# Altium footprint library Package_BGA.PcbLib: 230 footprints (part 2 of 28)
Each footprint in its own frame and in the unit in brackets; x right, y up, seen from the top. Pads: shape width x height; smd on the part's side, far side on the other; paste and mask are expansions set on the pad; w line width, h text height; cw(c..) or ccw(c..) is an arc to the next point about the centre after c.
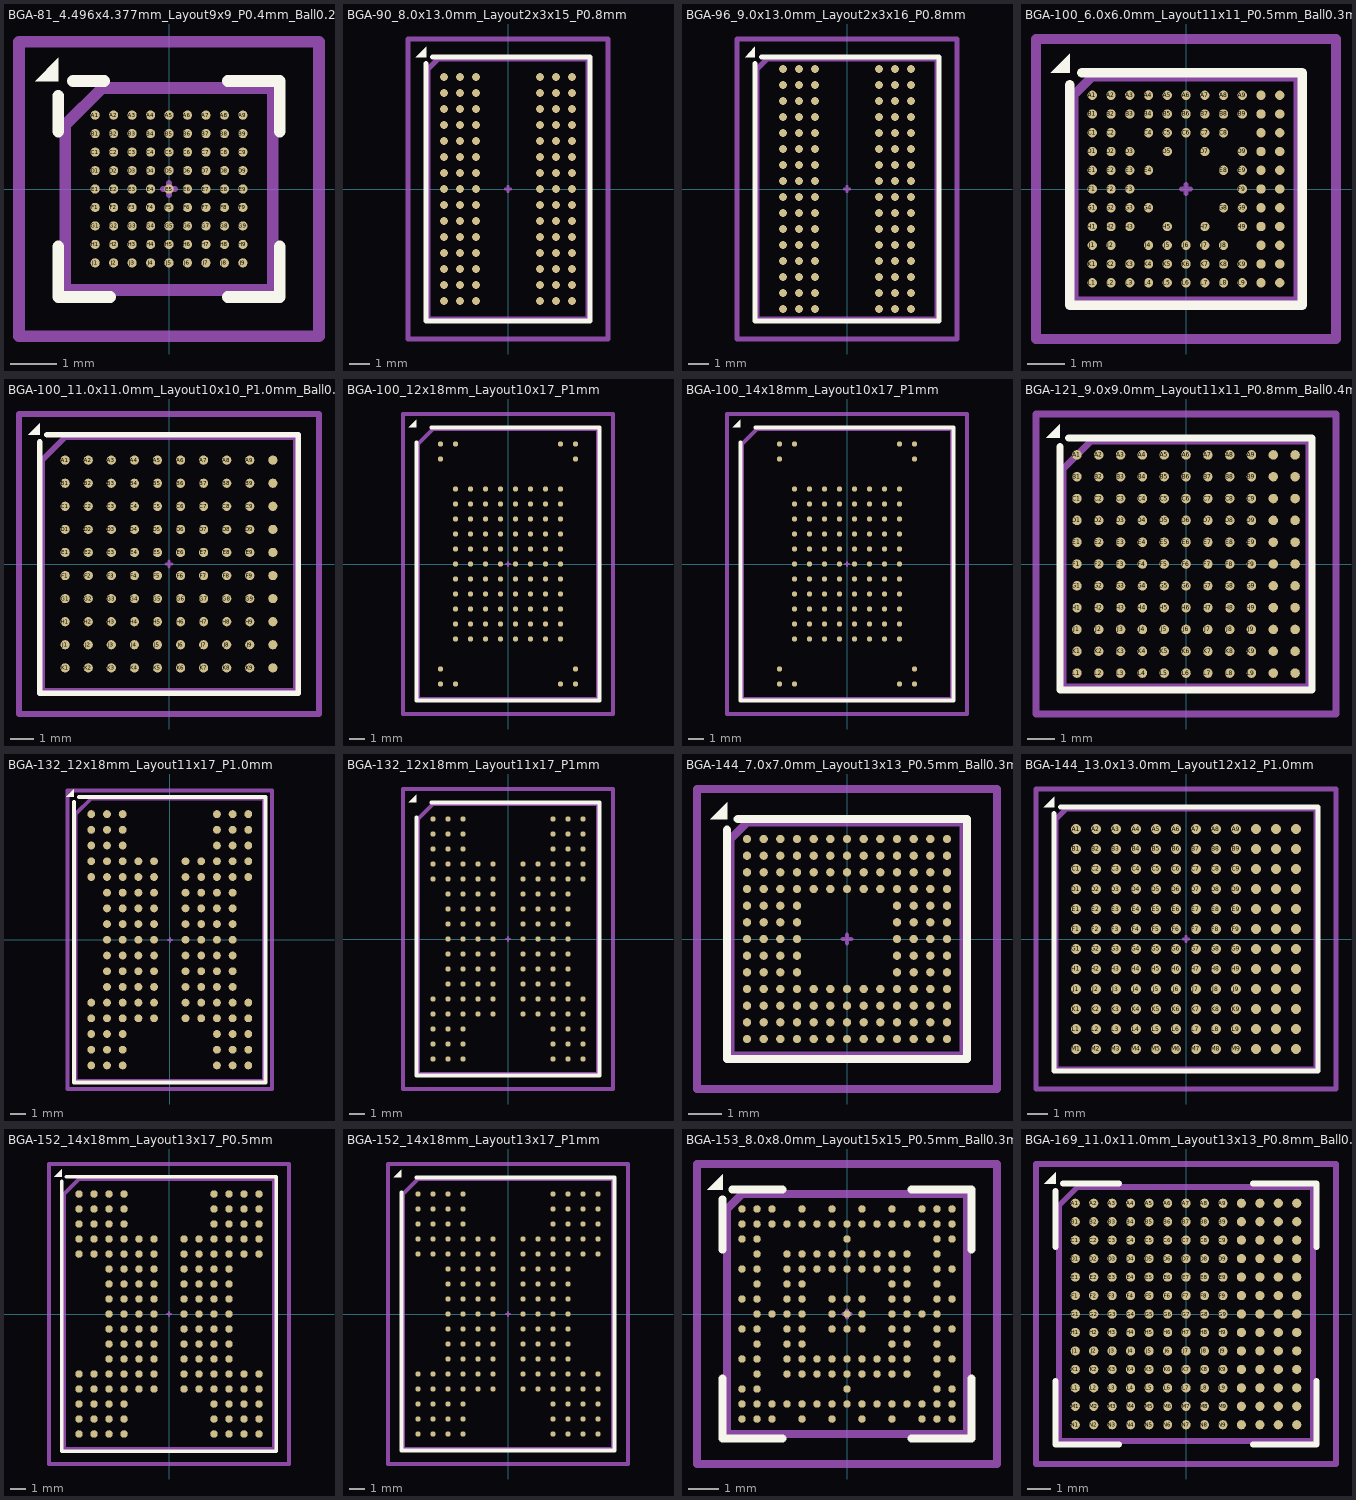
[diagram p1: the footprints below, top view; thin cyan lines are the x and y axes]

## BGA-81_4.496x4.377mm_Layout9x9_P0.4mm_Ball0.25mm_Pad0.2mm_NSMD [mm] "BGA-81_4.496x4.377mm_Layout9x9_P0.4mm_Ball0.25mm_Pad0.2mm_NSMD"
pads (81):
  round 0.2 smd: A1(-1.6,1.6) A2(-1.2,1.6) A3(-0.8,1.6) A4(-0.4,1.6) A5(0,1.6) A6(0.4,1.6) A7(0.8,1.6) A8(1.2,1.6) A9(1.6,1.6) B1(-1.6,1.2) B2(-1.2,1.2) B3(-0.8,1.2) B4(-0.4,1.2) B5(0,1.2) B6(0.4,1.2) B7(0.8,1.2) B8(1.2,1.2) B9(1.6,1.2) C1(-1.6,0.8) C2(-1.2,0.8) C3(-0.8,0.8) C4(-0.4,0.8) C5(0,0.8) C6(0.4,0.8) C7(0.8,0.8) C8(1.2,0.8) C9(1.6,0.8) D1(-1.6,0.4) D2(-1.2,0.4) D3(-0.8,0.4) D4(-0.4,0.4) D5(0,0.4) D6(0.4,0.4) D7(0.8,0.4) D8(1.2,0.4) D9(1.6,0.4) E1(-1.6,0) E2(-1.2,0) E3(-0.8,0) E4(-0.4,0) E5(0,0) E6(0.4,0) E7(0.8,0) E8(1.2,0) E9(1.6,0) F1(-1.6,-0.4) F2(-1.2,-0.4) F3(-0.8,-0.4) F4(-0.4,-0.4) F5(0,-0.4) F6(0.4,-0.4) F7(0.8,-0.4) F8(1.2,-0.4) F9(1.6,-0.4) G1(-1.6,-0.8) G2(-1.2,-0.8) G3(-0.8,-0.8) G4(-0.4,-0.8) G5(0,-0.8) G6(0.4,-0.8) G7(0.8,-0.8) G8(1.2,-0.8) G9(1.6,-0.8) H1(-1.6,-1.2) H2(-1.2,-1.2) H3(-0.8,-1.2) H4(-0.4,-1.2) H5(0,-1.2) H6(0.4,-1.2) H7(0.8,-1.2) H8(1.2,-1.2) H9(1.6,-1.2) J1(-1.6,-1.6) J2(-1.2,-1.6) J3(-0.8,-1.6) J4(-0.4,-1.6) J5(0,-1.6) J6(0.4,-1.6) J7(0.8,-1.6) J8(1.2,-1.6) J9(1.6,-1.6)
F.SilkS:
  region: -2.398,2.34 -2.898,2.34 -2.398,2.84
  lines w0.254: -2.398,-1.244 -2.398,-2.338 -1.274,-2.338 ; -2.398,1.244 -2.398,2.02 ; -2.078,2.34 -1.402,2.34 ; 1.274,-2.338 2.398,-2.338 2.398,-1.244 ; 1.274,2.338 2.398,2.338 2.398,1.244
Top Component Center:
  lines w0.127: -0.127,0 0.127,0 -0.127,0 ; 0,-0.127 0,0.127 0,-0.127
Top Assembly:
  lines w0.254: -2.248,-2.188 2.248,-2.188 2.248,2.188 -1.448,2.188 -2.248,1.389 -2.248,-2.188
Top Courtyard:
  lines w0.254: -3.25,-3.19 3.25,-3.19 3.25,3.19 -3.25,3.19 -3.25,-3.19
Top Designator:
  text ".Designator" at -3.432,-0.345 h1.52
3D body "BGA-81_4.496x4.377mm_Layout9x9_P0.4mm_Ball0.25mm_Pad0.2mm_NSMD.step": height 0.46, standoff -0.01, extent -2.188,-2.248 2.188,2.248

## BGA-90_8.0x13.0mm_Layout2x3x15_P0.8mm [mm] "BGA-90_8.0x13.0mm_Layout2x3x15_P0.8mm"
pads (90):
  round 0.4 smd: A1(-3.2,5.6) A2(-2.4,5.6) A3(-1.6,5.6) A7(1.6,5.6) A8(2.4,5.6) A9(3.2,5.6) B1(-3.2,4.8) B2(-2.4,4.8) B3(-1.6,4.8) B7(1.6,4.8) B8(2.4,4.8) B9(3.2,4.8) C1(-3.2,4) C2(-2.4,4) C3(-1.6,4) C7(1.6,4) C8(2.4,4) C9(3.2,4) D1(-3.2,3.2) D2(-2.4,3.2) D3(-1.6,3.2) D7(1.6,3.2) D8(2.4,3.2) D9(3.2,3.2) E1(-3.2,2.4) E2(-2.4,2.4) E3(-1.6,2.4) E7(1.6,2.4) E8(2.4,2.4) E9(3.2,2.4) F1(-3.2,1.6) F2(-2.4,1.6) F3(-1.6,1.6) F7(1.6,1.6) F8(2.4,1.6) F9(3.2,1.6) G1(-3.2,0.8) G2(-2.4,0.8) G3(-1.6,0.8) G7(1.6,0.8) G8(2.4,0.8) G9(3.2,0.8) H1(-3.2,0) H2(-2.4,0) H3(-1.6,0) H7(1.6,0) H8(2.4,0) H9(3.2,0) J1(-3.2,-0.8) J2(-2.4,-0.8) J3(-1.6,-0.8) J7(1.6,-0.8) J8(2.4,-0.8) J9(3.2,-0.8) K1(-3.2,-1.6) K2(-2.4,-1.6) K3(-1.6,-1.6) K7(1.6,-1.6) K8(2.4,-1.6) K9(3.2,-1.6) L1(-3.2,-2.4) L2(-2.4,-2.4) L3(-1.6,-2.4) L7(1.6,-2.4) L8(2.4,-2.4) L9(3.2,-2.4) M1(-3.2,-3.2) M2(-2.4,-3.2) M3(-1.6,-3.2) M7(1.6,-3.2) M8(2.4,-3.2) M9(3.2,-3.2) N1(-3.2,-4) N2(-2.4,-4) N3(-1.6,-4) N7(1.6,-4) N8(2.4,-4) N9(3.2,-4) P1(-3.2,-4.8) P2(-2.4,-4.8) P3(-1.6,-4.8) P7(1.6,-4.8) P8(2.4,-4.8) P9(3.2,-4.8) R1(-3.2,-5.6) R2(-2.4,-5.6) R3(-1.6,-5.6) R7(1.6,-5.6) R8(2.4,-5.6) R9(3.2,-5.6)
F.SilkS:
  region: -4.1,6.6 -4.6,6.6 -4.1,7.1
  lines w0.254: -4.1,6.28 -4.1,-6.6 4.1,-6.6 4.1,6.6 -3.78,6.6
Top Component Center:
  lines w0.127: -0.127,0 0.127,0 -0.127,0 ; 0,-0.127 0,0.127 0,-0.127
Top Assembly:
  lines w0.254: -4,-6.5 -4,6 -3.5,6.5 4,6.5 4,-6.5 -4,-6.5
Top Courtyard:
  lines w0.254: -5,-7.5 -5,7.5 5,7.5 5,-7.5 -5,-7.5
Top Designator:
  text ".Designator" at -3.432,-0.345 h1.52
3D body "BGA-90_8.0x13.0mm_Layout2x3x15_P0.8mm.step": height 1.2, standoff -0.01, extent -4,-6.5 4,6.5

## BGA-96_9.0x13.0mm_Layout2x3x16_P0.8mm [mm] "BGA-96_9.0x13.0mm_Layout2x3x16_P0.8mm"
pads (96):
  round 0.4 smd: A1(-3.2,6) A2(-2.4,6) A3(-1.6,6) A7(1.6,6) A8(2.4,6) A9(3.2,6) B1(-3.2,5.2) B2(-2.4,5.2) B3(-1.6,5.2) B7(1.6,5.2) B8(2.4,5.2) B9(3.2,5.2) C1(-3.2,4.4) C2(-2.4,4.4) C3(-1.6,4.4) C7(1.6,4.4) C8(2.4,4.4) C9(3.2,4.4) D1(-3.2,3.6) D2(-2.4,3.6) D3(-1.6,3.6) D7(1.6,3.6) D8(2.4,3.6) D9(3.2,3.6) E1(-3.2,2.8) E2(-2.4,2.8) E3(-1.6,2.8) E7(1.6,2.8) E8(2.4,2.8) E9(3.2,2.8) F1(-3.2,2) F2(-2.4,2) F3(-1.6,2) F7(1.6,2) F8(2.4,2) F9(3.2,2) G1(-3.2,1.2) G2(-2.4,1.2) G3(-1.6,1.2) G7(1.6,1.2) G8(2.4,1.2) G9(3.2,1.2) H1(-3.2,0.4) H2(-2.4,0.4) H3(-1.6,0.4) H7(1.6,0.4) H8(2.4,0.4) H9(3.2,0.4) J1(-3.2,-0.4) J2(-2.4,-0.4) J3(-1.6,-0.4) J7(1.6,-0.4) J8(2.4,-0.4) J9(3.2,-0.4) K1(-3.2,-1.2) K2(-2.4,-1.2) K3(-1.6,-1.2) K7(1.6,-1.2) K8(2.4,-1.2) K9(3.2,-1.2) L1(-3.2,-2) L2(-2.4,-2) L3(-1.6,-2) L7(1.6,-2) L8(2.4,-2) L9(3.2,-2) M1(-3.2,-2.8) M2(-2.4,-2.8) M3(-1.6,-2.8) M7(1.6,-2.8) M8(2.4,-2.8) M9(3.2,-2.8) N1(-3.2,-3.6) N2(-2.4,-3.6) N3(-1.6,-3.6) N7(1.6,-3.6) N8(2.4,-3.6) N9(3.2,-3.6) P1(-3.2,-4.4) P2(-2.4,-4.4) P3(-1.6,-4.4) P7(1.6,-4.4) P8(2.4,-4.4) P9(3.2,-4.4) R1(-3.2,-5.2) R2(-2.4,-5.2) R3(-1.6,-5.2) R7(1.6,-5.2) R8(2.4,-5.2) R9(3.2,-5.2) T1(-3.2,-6) T2(-2.4,-6) T3(-1.6,-6) T7(1.6,-6) T8(2.4,-6) T9(3.2,-6)
F.SilkS:
  region: -4.6,6.6 -5.1,6.6 -4.6,7.1
  lines w0.254: -4.6,6.28 -4.6,-6.6 4.6,-6.6 4.6,6.6 -4.28,6.6
Top Component Center:
  lines w0.127: -0.127,0 0.127,0 -0.127,0 ; 0,-0.127 0,0.127 0,-0.127
Top Assembly:
  lines w0.254: -4.5,-6.5 -4.5,6 -4,6.5 4.5,6.5 4.5,-6.5 -4.5,-6.5
Top Courtyard:
  lines w0.254: -5.5,-7.5 -5.5,7.5 5.5,7.5 5.5,-7.5 -5.5,-7.5
Top Designator:
  text ".Designator" at -3.432,-0.345 h1.52
3D body "BGA-96_9.0x13.0mm_Layout2x3x16_P0.8mm.step": height 1.2, standoff -0.01, extent -4.5,-6.5 4.5,6.5

## BGA-100_6.0x6.0mm_Layout11x11_P0.5mm_Ball0.3mm_Pad0.25mm_NSMD [mm] "BGA-100_6.0x6.0mm_Layout11x11_P0.5mm_Ball0.3mm_Pad0.25mm_NSMD"
pads (100):
  round 0.25 smd: A1(-2.5,2.5) A2(-2,2.5) A3(-1.5,2.5) A4(-1,2.5) A5(-0.5,2.5) A6(0,2.5) A7(0.5,2.5) A8(1,2.5) A9(1.5,2.5) A10(2,2.5) A11(2.5,2.5) B1(-2.5,2) B2(-2,2) B3(-1.5,2) B4(-1,2) B5(-0.5,2) B6(0,2) B7(0.5,2) B8(1,2) B9(1.5,2) B10(2,2) B11(2.5,2) C1(-2.5,1.5) C2(-2,1.5) C4(-1,1.5) C5(-0.5,1.5) C6(0,1.5) C7(0.5,1.5) C8(1,1.5) C10(2,1.5) C11(2.5,1.5) D1(-2.5,1) D2(-2,1) D3(-1.5,1) D5(-0.5,1) D7(0.5,1) D9(1.5,1) D10(2,1) D11(2.5,1) E1(-2.5,0.5) E2(-2,0.5) E3(-1.5,0.5) E4(-1,0.5) E8(1,0.5) E9(1.5,0.5) E10(2,0.5) E11(2.5,0.5) F1(-2.5,0) F2(-2,0) F3(-1.5,0) F9(1.5,0) F10(2,0) F11(2.5,0) G1(-2.5,-0.5) G2(-2,-0.5) G3(-1.5,-0.5) G4(-1,-0.5) G8(1,-0.5) G9(1.5,-0.5) G10(2,-0.5) G11(2.5,-0.5) H1(-2.5,-1) H2(-2,-1) H3(-1.5,-1) H5(-0.5,-1) H7(0.5,-1) H9(1.5,-1) H10(2,-1) H11(2.5,-1) J1(-2.5,-1.5) J2(-2,-1.5) J4(-1,-1.5) J5(-0.5,-1.5) J6(0,-1.5) J7(0.5,-1.5) J8(1,-1.5) J10(2,-1.5) J11(2.5,-1.5) K1(-2.5,-2) K2(-2,-2) K3(-1.5,-2) K4(-1,-2) K5(-0.5,-2) K6(0,-2) K7(0.5,-2) K8(1,-2) K9(1.5,-2) K10(2,-2) K11(2.5,-2) L1(-2.5,-2.5) L2(-2,-2.5) L3(-1.5,-2.5) L4(-1,-2.5) L5(-0.5,-2.5) L6(0,-2.5) L7(0.5,-2.5) L8(1,-2.5) L9(1.5,-2.5) L10(2,-2.5) L11(2.5,-2.5)
F.SilkS:
  region: -3.1,3.1 -3.6,3.1 -3.1,3.6
  lines w0.254: -3.1,2.78 -3.1,-3.1 3.1,-3.1 3.1,3.1 -2.78,3.1
Top Component Center:
  lines w0.127: -0.127,0 0.127,0 -0.127,0 ; 0,-0.127 0,0.127 0,-0.127
Top Assembly:
  lines w0.254: -3,-3 3,-3 3,3 -2.5,3 -3,2.5 -3,-3
Top Courtyard:
  lines w0.254: -4,-4 4,-4 4,4 -4,4 -4,-4
Top Designator:
  text ".Designator" at -3.432,-0.345 h1.52
3D body "BGA-100_6.0x6.0mm_Layout11x11_P0.5mm_Ball0.3mm_Pad0.25mm_NSMD.step": height 1.05, standoff -0.01, extent -3,-3 3,3

## BGA-100_11.0x11.0mm_Layout10x10_P1.0mm_Ball0.5mm_Pad0.4mm_NSMD [mm] "BGA-100_11.0x11.0mm_Layout10x10_P1.0mm_Ball0.5mm_Pad0.4mm_NSMD"
pads (100):
  round 0.4 smd: A1(-4.5,4.5) A2(-3.5,4.5) A3(-2.5,4.5) A4(-1.5,4.5) A5(-0.5,4.5) A6(0.5,4.5) A7(1.5,4.5) A8(2.5,4.5) A9(3.5,4.5) A10(4.5,4.5) B1(-4.5,3.5) B2(-3.5,3.5) B3(-2.5,3.5) B4(-1.5,3.5) B5(-0.5,3.5) B6(0.5,3.5) B7(1.5,3.5) B8(2.5,3.5) B9(3.5,3.5) B10(4.5,3.5) C1(-4.5,2.5) C2(-3.5,2.5) C3(-2.5,2.5) C4(-1.5,2.5) C5(-0.5,2.5) C6(0.5,2.5) C7(1.5,2.5) C8(2.5,2.5) C9(3.5,2.5) C10(4.5,2.5) D1(-4.5,1.5) D2(-3.5,1.5) D3(-2.5,1.5) D4(-1.5,1.5) D5(-0.5,1.5) D6(0.5,1.5) D7(1.5,1.5) D8(2.5,1.5) D9(3.5,1.5) D10(4.5,1.5) E1(-4.5,0.5) E2(-3.5,0.5) E3(-2.5,0.5) E4(-1.5,0.5) E5(-0.5,0.5) E6(0.5,0.5) E7(1.5,0.5) E8(2.5,0.5) E9(3.5,0.5) E10(4.5,0.5) F1(-4.5,-0.5) F2(-3.5,-0.5) F3(-2.5,-0.5) F4(-1.5,-0.5) F5(-0.5,-0.5) F6(0.5,-0.5) F7(1.5,-0.5) F8(2.5,-0.5) F9(3.5,-0.5) F10(4.5,-0.5) G1(-4.5,-1.5) G2(-3.5,-1.5) G3(-2.5,-1.5) G4(-1.5,-1.5) G5(-0.5,-1.5) G6(0.5,-1.5) G7(1.5,-1.5) G8(2.5,-1.5) G9(3.5,-1.5) G10(4.5,-1.5) H1(-4.5,-2.5) H2(-3.5,-2.5) H3(-2.5,-2.5) H4(-1.5,-2.5) H5(-0.5,-2.5) H6(0.5,-2.5) H7(1.5,-2.5) H8(2.5,-2.5) H9(3.5,-2.5) H10(4.5,-2.5) J1(-4.5,-3.5) J2(-3.5,-3.5) J3(-2.5,-3.5) J4(-1.5,-3.5) J5(-0.5,-3.5) J6(0.5,-3.5) J7(1.5,-3.5) J8(2.5,-3.5) J9(3.5,-3.5) J10(4.5,-3.5) K1(-4.5,-4.5) K2(-3.5,-4.5) K3(-2.5,-4.5) K4(-1.5,-4.5) K5(-0.5,-4.5) K6(0.5,-4.5) K7(1.5,-4.5) K8(2.5,-4.5) K9(3.5,-4.5) K10(4.5,-4.5)
F.SilkS:
  region: -5.6,5.6 -6.1,5.6 -5.6,6.1
  lines w0.254: -5.6,5.28 -5.6,-5.6 5.6,-5.6 5.6,5.6 -5.28,5.6
Top Component Center:
  lines w0.127: -0.127,0 0.127,0 -0.127,0 ; 0,-0.127 0,0.127 0,-0.127
Top Assembly:
  lines w0.254: -5.5,-5.5 -5.5,4.5 -4.5,5.5 5.5,5.5 5.5,-5.5 -5.5,-5.5
Top Courtyard:
  lines w0.254: -6.5,-6.5 -6.5,6.5 6.5,6.5 6.5,-6.5 -6.5,-6.5
Top Designator:
  text ".Designator" at -3.432,-0.345 h1.52
3D body "BGA-100_11.0x11.0mm_Layout10x10_P1.0mm_Ball0.5mm_Pad0.4mm_NSMD.step": height 1.4, standoff -0.01, extent -5.5,-5.5 5.5,5.5

## BGA-100_12x18mm_Layout10x17_P1mm [mm] "BGA-100_12x18mm_Layout10x17_P1mm"
pads (100):
  round 0.36 smd: A1(-4.5,8) A2(-3.5,8) A9(3.5,8) A10(4.5,8) B1(-4.5,7) B10(4.5,7) D2(-3.5,5) D3(-2.5,5) D4(-1.5,5) D5(-0.5,5) D6(0.5,5) D7(1.5,5) D8(2.5,5) D9(3.5,5) E2(-3.5,4) E3(-2.5,4) E4(-1.5,4) E5(-0.5,4) E6(0.5,4) E7(1.5,4) E8(2.5,4) E9(3.5,4) F2(-3.5,3) F3(-2.5,3) F4(-1.5,3) F5(-0.5,3) F6(0.5,3) F7(1.5,3) F8(2.5,3) F9(3.5,3) G2(-3.5,2) G3(-2.5,2) G4(-1.5,2) G5(-0.5,2) G6(0.5,2) G7(1.5,2) G8(2.5,2) G9(3.5,2) H2(-3.5,1) H3(-2.5,1) H4(-1.5,1) H5(-0.5,1) H6(0.5,1) H7(1.5,1) H8(2.5,1) H9(3.5,1) J2(-3.5,0) J3(-2.5,0) J4(-1.5,0) J5(-0.5,0) J6(0.5,0) J7(1.5,0) J8(2.5,0) J9(3.5,0) K2(-3.5,-1) K3(-2.5,-1) K4(-1.5,-1) K5(-0.5,-1) K6(0.5,-1) K7(1.5,-1) K8(2.5,-1) K9(3.5,-1) L2(-3.5,-2) L3(-2.5,-2) L4(-1.5,-2) L5(-0.5,-2) L6(0.5,-2) L7(1.5,-2) L8(2.5,-2) L9(3.5,-2) M2(-3.5,-3) M3(-2.5,-3) M4(-1.5,-3) M5(-0.5,-3) M6(0.5,-3) M7(1.5,-3) M8(2.5,-3) M9(3.5,-3) N2(-3.5,-4) N3(-2.5,-4) N4(-1.5,-4) N5(-0.5,-4) N6(0.5,-4) N7(1.5,-4) N8(2.5,-4) N9(3.5,-4) P2(-3.5,-5) P3(-2.5,-5) P4(-1.5,-5) P5(-0.5,-5) P6(0.5,-5) P7(1.5,-5) P8(2.5,-5) P9(3.5,-5) T1(-4.5,-7) T10(4.5,-7) U1(-4.5,-8) U2(-3.5,-8) U9(3.5,-8) U10(4.5,-8)
F.SilkS:
  region: -6.11,9.11 -6.61,9.11 -6.11,9.61
  lines w0.254: -6.11,8.11 -6.11,-9.11 6.11,-9.11 6.11,9.11 -5.11,9.11
Top Component Center:
  lines w0.127: -0.127,0 0.127,0 -0.127,0 ; 0,-0.127 0,0.127 0,-0.127
Top Assembly:
  lines w0.254: -6,-9 -6,8 -5,9 6,9 6,-9 -6,-9
Top Courtyard:
  lines w0.254: -7,-10 -7,10 7,10 7,-10 -7,-10
Top Designator:
  text ".Designator" at -3.432,-0.345 h1.52

## BGA-100_14x18mm_Layout10x17_P1mm [mm] "BGA-100_14x18mm_Layout10x17_P1mm"
pads (100):
  round 0.36 smd: A1(-4.5,8) A2(-3.5,8) A9(3.5,8) A10(4.5,8) B1(-4.5,7) B10(4.5,7) D2(-3.5,5) D3(-2.5,5) D4(-1.5,5) D5(-0.5,5) D6(0.5,5) D7(1.5,5) D8(2.5,5) D9(3.5,5) E2(-3.5,4) E3(-2.5,4) E4(-1.5,4) E5(-0.5,4) E6(0.5,4) E7(1.5,4) E8(2.5,4) E9(3.5,4) F2(-3.5,3) F3(-2.5,3) F4(-1.5,3) F5(-0.5,3) F6(0.5,3) F7(1.5,3) F8(2.5,3) F9(3.5,3) G2(-3.5,2) G3(-2.5,2) G4(-1.5,2) G5(-0.5,2) G6(0.5,2) G7(1.5,2) G8(2.5,2) G9(3.5,2) H2(-3.5,1) H3(-2.5,1) H4(-1.5,1) H5(-0.5,1) H6(0.5,1) H7(1.5,1) H8(2.5,1) H9(3.5,1) J2(-3.5,0) J3(-2.5,0) J4(-1.5,0) J5(-0.5,0) J6(0.5,0) J7(1.5,0) J8(2.5,0) J9(3.5,0) K2(-3.5,-1) K3(-2.5,-1) K4(-1.5,-1) K5(-0.5,-1) K6(0.5,-1) K7(1.5,-1) K8(2.5,-1) K9(3.5,-1) L2(-3.5,-2) L3(-2.5,-2) L4(-1.5,-2) L5(-0.5,-2) L6(0.5,-2) L7(1.5,-2) L8(2.5,-2) L9(3.5,-2) M2(-3.5,-3) M3(-2.5,-3) M4(-1.5,-3) M5(-0.5,-3) M6(0.5,-3) M7(1.5,-3) M8(2.5,-3) M9(3.5,-3) N2(-3.5,-4) N3(-2.5,-4) N4(-1.5,-4) N5(-0.5,-4) N6(0.5,-4) N7(1.5,-4) N8(2.5,-4) N9(3.5,-4) P2(-3.5,-5) P3(-2.5,-5) P4(-1.5,-5) P5(-0.5,-5) P6(0.5,-5) P7(1.5,-5) P8(2.5,-5) P9(3.5,-5) T1(-4.5,-7) T10(4.5,-7) U1(-4.5,-8) U2(-3.5,-8) U9(3.5,-8) U10(4.5,-8)
F.SilkS:
  region: -7.11,9.11 -7.61,9.11 -7.11,9.61
  lines w0.254: -7.11,8.11 -7.11,-9.11 7.11,-9.11 7.11,9.11 -6.11,9.11
Top Component Center:
  lines w0.127: -0.127,0 0.127,0 -0.127,0 ; 0,-0.127 0,0.127 0,-0.127
Top Assembly:
  lines w0.254: -7,-9 -7,8 -6,9 7,9 7,-9 -7,-9
Top Courtyard:
  lines w0.254: -8,-10 -8,10 8,10 8,-10 -8,-10
Top Designator:
  text ".Designator" at -3.432,-0.345 h1.52

## BGA-121_9.0x9.0mm_Layout11x11_P0.8mm_Ball0.4mm_Pad0.35mm_NSMD [mm] "BGA-121_9.0x9.0mm_Layout11x11_P0.8mm_Ball0.4mm_Pad0.35mm_NSMD"
pads (121):
  round 0.35 smd: A1(-4,4) A2(-3.2,4) A3(-2.4,4) A4(-1.6,4) A5(-0.8,4) A6(0,4) A7(0.8,4) A8(1.6,4) A9(2.4,4) A10(3.2,4) A11(4,4) B1(-4,3.2) B2(-3.2,3.2) B3(-2.4,3.2) B4(-1.6,3.2) B5(-0.8,3.2) B6(0,3.2) B7(0.8,3.2) B8(1.6,3.2) B9(2.4,3.2) B10(3.2,3.2) B11(4,3.2) C1(-4,2.4) C2(-3.2,2.4) C3(-2.4,2.4) C4(-1.6,2.4) C5(-0.8,2.4) C6(0,2.4) C7(0.8,2.4) C8(1.6,2.4) C9(2.4,2.4) C10(3.2,2.4) C11(4,2.4) D1(-4,1.6) D2(-3.2,1.6) D3(-2.4,1.6) D4(-1.6,1.6) D5(-0.8,1.6) D6(0,1.6) D7(0.8,1.6) D8(1.6,1.6) D9(2.4,1.6) D10(3.2,1.6) D11(4,1.6) E1(-4,0.8) E2(-3.2,0.8) E3(-2.4,0.8) E4(-1.6,0.8) E5(-0.8,0.8) E6(0,0.8) E7(0.8,0.8) E8(1.6,0.8) E9(2.4,0.8) E10(3.2,0.8) E11(4,0.8) F1(-4,0) F2(-3.2,0) F3(-2.4,0) F4(-1.6,0) F5(-0.8,0) F6(0,0) F7(0.8,0) F8(1.6,0) F9(2.4,0) F10(3.2,0) F11(4,0) G1(-4,-0.8) G2(-3.2,-0.8) G3(-2.4,-0.8) G4(-1.6,-0.8) G5(-0.8,-0.8) G6(0,-0.8) G7(0.8,-0.8) G8(1.6,-0.8) G9(2.4,-0.8) G10(3.2,-0.8) G11(4,-0.8) H1(-4,-1.6) H2(-3.2,-1.6) H3(-2.4,-1.6) H4(-1.6,-1.6) H5(-0.8,-1.6) H6(0,-1.6) H7(0.8,-1.6) H8(1.6,-1.6) H9(2.4,-1.6) H10(3.2,-1.6) H11(4,-1.6) J1(-4,-2.4) J2(-3.2,-2.4) J3(-2.4,-2.4) J4(-1.6,-2.4) J5(-0.8,-2.4) J6(0,-2.4) J7(0.8,-2.4) J8(1.6,-2.4) J9(2.4,-2.4) J10(3.2,-2.4) J11(4,-2.4) K1(-4,-3.2) K2(-3.2,-3.2) K3(-2.4,-3.2) K4(-1.6,-3.2) K5(-0.8,-3.2) K6(0,-3.2) K7(0.8,-3.2) K8(1.6,-3.2) K9(2.4,-3.2) K10(3.2,-3.2) K11(4,-3.2) L1(-4,-4) L2(-3.2,-4) L3(-2.4,-4) L4(-1.6,-4) L5(-0.8,-4) L6(0,-4) L7(0.8,-4) L8(1.6,-4) L9(2.4,-4) L10(3.2,-4) L11(4,-4)
F.SilkS:
  region: -4.625,4.625 -5.125,4.625 -4.625,5.125
  lines w0.254: -4.625,4.305 -4.625,-4.625 4.625,-4.625 4.625,4.625 -4.305,4.625
Top Component Center:
  lines w0.127: -0.127,0 0.127,0 -0.127,0 ; 0,-0.127 0,0.127 0,-0.127
Top Assembly:
  lines w0.254: -4.5,-4.5 4.5,-4.5 4.5,4.5 -3.5,4.5 -4.5,3.5 -4.5,-4.5
Top Courtyard:
  lines w0.254: -5.5,-5.5 5.5,-5.5 5.5,5.5 -5.5,5.5 -5.5,-5.5
Top Designator:
  text ".Designator" at -3.432,-0.345 h1.52
3D body "BGA-121_9.0x9.0mm_Layout11x11_P0.8mm.step": height 1.1, standoff -0.01, extent -4.5,-4.5 4.5,4.5

## BGA-132_12x18mm_Layout11x17_P1.0mm [mm] "BGA-132_12x18mm_Layout11x17_P1.0mm"
pads (132):
  round 0.5 smd: A1(-5,8) A2(-4,8) A3(-3,8) A9(3,8) A10(4,8) A11(5,8) B1(-5,7) B2(-4,7) B3(-3,7) B9(3,7) B10(4,7) B11(5,7) C1(-5,6) C2(-4,6) C3(-3,6) C9(3,6) C10(4,6) C11(5,6) D1(-5,5) D2(-4,5) D3(-3,5) D4(-2,5) D5(-1,5) D7(1,5) D8(2,5) D9(3,5) D10(4,5) D11(5,5) E1(-5,4) E2(-4,4) E3(-3,4) E4(-2,4) E5(-1,4) E7(1,4) E8(2,4) E9(3,4) E10(4,4) E11(5,4) F2(-4,3) F3(-3,3) F4(-2,3) F5(-1,3) F7(1,3) F8(2,3) F9(3,3) F10(4,3) G2(-4,2) G3(-3,2) G4(-2,2) G5(-1,2) G7(1,2) G8(2,2) G9(3,2) G10(4,2) H2(-4,1) H3(-3,1) H4(-2,1) H5(-1,1) H7(1,1) H8(2,1) H9(3,1) H10(4,1) J2(-4,0) J3(-3,0) J4(-2,0) J5(-1,0) J7(1,0) J8(2,0) J9(3,0) J10(4,0) K2(-4,-1) K3(-3,-1) K4(-2,-1) K5(-1,-1) K7(1,-1) K8(2,-1) K9(3,-1) K10(4,-1) L2(-4,-2) L3(-3,-2) L4(-2,-2) L5(-1,-2) L7(1,-2) L8(2,-2) L9(3,-2) L10(4,-2) M2(-4,-3) M3(-3,-3) M4(-2,-3) M5(-1,-3) M7(1,-3) M8(2,-3) M9(3,-3) M10(4,-3) N1(-5,-4) N2(-4,-4) N3(-3,-4) N4(-2,-4) N5(-1,-4) N7(1,-4) N8(2,-4) N9(3,-4) N10(4,-4) N11(5,-4) P1(-5,-5) P2(-4,-5) P3(-3,-5) P4(-2,-5) P5(-1,-5) P7(1,-5) P8(2,-5) P9(3,-5) P10(4,-5) P11(5,-5) R1(-5,-6) R2(-4,-6) R3(-3,-6) R9(3,-6) R10(4,-6) R11(5,-6) T1(-5,-7) T2(-4,-7) T3(-3,-7) T9(3,-7) T10(4,-7) T11(5,-7) U1(-5,-8) U2(-4,-8) U3(-3,-8) U9(3,-8) U10(4,-8) U11(5,-8)
F.SilkS:
  region: -6.1,9.1 -6.6,9.1 -6.1,9.6
  lines w0.254: -6.1,8.78 -6.1,-9.1 6.1,-9.1 6.1,9.1 -5.78,9.1
Top Component Center:
  lines w0.127: -0.127,0 0.127,0 -0.127,0 ; 0,-0.127 0,0.127 0,-0.127
Top Assembly:
  lines w0.254: -6,-9 -6,8 -5,9 6,9 6,-9 -6,-9
  text "'.Designator'" at -4.047,9.36 h1
Top Courtyard:
  lines w0.254: -6.5,-9.5 -6.5,9.5 6.5,9.5 6.5,-9.5 -6.5,-9.5
Top Designator:
  text ".Designator" at -7.618,-0.043 h1.52

## BGA-132_12x18mm_Layout11x17_P1mm [mm] "BGA-132_12x18mm_Layout11x17_P1mm"
pads (132):
  round 0.36 smd: A1(-5,8) A2(-4,8) A3(-3,8) A9(3,8) A10(4,8) A11(5,8) B1(-5,7) B2(-4,7) B3(-3,7) B9(3,7) B10(4,7) B11(5,7) C1(-5,6) C2(-4,6) C3(-3,6) C9(3,6) C10(4,6) C11(5,6) D1(-5,5) D2(-4,5) D3(-3,5) D4(-2,5) D5(-1,5) D7(1,5) D8(2,5) D9(3,5) D10(4,5) D11(5,5) E1(-5,4) E2(-4,4) E3(-3,4) E4(-2,4) E5(-1,4) E7(1,4) E8(2,4) E9(3,4) E10(4,4) E11(5,4) F2(-4,3) F3(-3,3) F4(-2,3) F5(-1,3) F7(1,3) F8(2,3) F9(3,3) F10(4,3) G2(-4,2) G3(-3,2) G4(-2,2) G5(-1,2) G7(1,2) G8(2,2) G9(3,2) G10(4,2) H2(-4,1) H3(-3,1) H4(-2,1) H5(-1,1) H7(1,1) H8(2,1) H9(3,1) H10(4,1) J2(-4,0) J3(-3,0) J4(-2,0) J5(-1,0) J7(1,0) J8(2,0) J9(3,0) J10(4,0) K2(-4,-1) K3(-3,-1) K4(-2,-1) K5(-1,-1) K7(1,-1) K8(2,-1) K9(3,-1) K10(4,-1) L2(-4,-2) L3(-3,-2) L4(-2,-2) L5(-1,-2) L7(1,-2) L8(2,-2) L9(3,-2) L10(4,-2) M2(-4,-3) M3(-3,-3) M4(-2,-3) M5(-1,-3) M7(1,-3) M8(2,-3) M9(3,-3) M10(4,-3) N1(-5,-4) N2(-4,-4) N3(-3,-4) N4(-2,-4) N5(-1,-4) N7(1,-4) N8(2,-4) N9(3,-4) N10(4,-4) N11(5,-4) P1(-5,-5) P2(-4,-5) P3(-3,-5) P4(-2,-5) P5(-1,-5) P7(1,-5) P8(2,-5) P9(3,-5) P10(4,-5) P11(5,-5) R1(-5,-6) R2(-4,-6) R3(-3,-6) R9(3,-6) R10(4,-6) R11(5,-6) T1(-5,-7) T2(-4,-7) T3(-3,-7) T9(3,-7) T10(4,-7) T11(5,-7) U1(-5,-8) U2(-4,-8) U3(-3,-8) U9(3,-8) U10(4,-8) U11(5,-8)
F.SilkS:
  region: -6.11,9.11 -6.61,9.11 -6.11,9.61
  lines w0.254: -6.11,8.11 -6.11,-9.11 6.11,-9.11 6.11,9.11 -5.11,9.11
Top Component Center:
  lines w0.127: -0.127,0 0.127,0 -0.127,0 ; 0,-0.127 0,0.127 0,-0.127
Top Assembly:
  lines w0.254: -6,-9 -6,8 -5,9 6,9 6,-9 -6,-9
Top Courtyard:
  lines w0.254: -7,-10 -7,10 7,10 7,-10 -7,-10
Top Designator:
  text ".Designator" at -3.432,-0.345 h1.52

## BGA-144_7.0x7.0mm_Layout13x13_P0.5mm_Ball0.3mm_Pad0.25mm_NSMD [mm] "BGA-144_7.0x7.0mm_Layout13x13_P0.5mm_Ball0.3mm_Pad0.25mm_NSMD"
pads (144):
  round 0.25 smd: A1(-3,3) A2(-2.5,3) A3(-2,3) A4(-1.5,3) A5(-1,3) A6(-0.5,3) A7(0,3) A8(0.5,3) A9(1,3) A10(1.5,3) A11(2,3) A12(2.5,3) A13(3,3) B1(-3,2.5) B2(-2.5,2.5) B3(-2,2.5) B4(-1.5,2.5) B5(-1,2.5) B6(-0.5,2.5) B7(0,2.5) B8(0.5,2.5) B9(1,2.5) B10(1.5,2.5) B11(2,2.5) B12(2.5,2.5) B13(3,2.5) C1(-3,2) C2(-2.5,2) C3(-2,2) C4(-1.5,2) C5(-1,2) C6(-0.5,2) C7(0,2) C8(0.5,2) C9(1,2) C10(1.5,2) C11(2,2) C12(2.5,2) C13(3,2) D1(-3,1.5) D2(-2.5,1.5) D3(-2,1.5) D4(-1.5,1.5) D5(-1,1.5) D6(-0.5,1.5) D7(0,1.5) D8(0.5,1.5) D9(1,1.5) D10(1.5,1.5) D11(2,1.5) D12(2.5,1.5) D13(3,1.5) E1(-3,1) E2(-2.5,1) E3(-2,1) E4(-1.5,1) E10(1.5,1) E11(2,1) E12(2.5,1) E13(3,1) F1(-3,0.5) F2(-2.5,0.5) F3(-2,0.5) F4(-1.5,0.5) F10(1.5,0.5) F11(2,0.5) F12(2.5,0.5) F13(3,0.5) G1(-3,0) G2(-2.5,0) G3(-2,0) G4(-1.5,0) G10(1.5,0) G11(2,0) G12(2.5,0) G13(3,0) H1(-3,-0.5) H2(-2.5,-0.5) H3(-2,-0.5) H4(-1.5,-0.5) H10(1.5,-0.5) H11(2,-0.5) H12(2.5,-0.5) H13(3,-0.5) J1(-3,-1) J2(-2.5,-1) J3(-2,-1) J4(-1.5,-1) J10(1.5,-1) J11(2,-1) J12(2.5,-1) J13(3,-1) K1(-3,-1.5) K2(-2.5,-1.5) K3(-2,-1.5) K4(-1.5,-1.5) K5(-1,-1.5) K6(-0.5,-1.5) K7(0,-1.5) K8(0.5,-1.5) K9(1,-1.5) K10(1.5,-1.5) K11(2,-1.5) K12(2.5,-1.5) K13(3,-1.5) L1(-3,-2) L2(-2.5,-2) L3(-2,-2) L4(-1.5,-2) L5(-1,-2) L6(-0.5,-2) L7(0,-2) L8(0.5,-2) L9(1,-2) L10(1.5,-2) L11(2,-2) L12(2.5,-2) L13(3,-2) M1(-3,-2.5) M2(-2.5,-2.5) M3(-2,-2.5) M4(-1.5,-2.5) M5(-1,-2.5) M6(-0.5,-2.5) M7(0,-2.5) M8(0.5,-2.5) M9(1,-2.5) M10(1.5,-2.5) M11(2,-2.5) M12(2.5,-2.5) M13(3,-2.5) N1(-3,-3) N2(-2.5,-3) N3(-2,-3) N4(-1.5,-3) N5(-1,-3) N6(-0.5,-3) N7(0,-3) N8(0.5,-3) N9(1,-3) N10(1.5,-3) N11(2,-3) N12(2.5,-3) N13(3,-3)
F.SilkS:
  region: -3.6,3.6 -4.1,3.6 -3.6,4.1
  lines w0.254: -3.6,3.28 -3.6,-3.6 3.6,-3.6 3.6,3.6 -3.28,3.6
Top Component Center:
  lines w0.127: -0.127,0 0.127,0 -0.127,0 ; 0,-0.127 0,0.127 0,-0.127
Top Assembly:
  lines w0.254: -3.5,-3.5 3.5,-3.5 3.5,3.5 -3,3.5 -3.5,3 -3.5,-3.5
Top Courtyard:
  lines w0.254: -4.5,-4.5 4.5,-4.5 4.5,4.5 -4.5,4.5 -4.5,-4.5
Top Designator:
  text ".Designator" at -3.432,-0.345 h1.52
3D body "BGA-144_7.0x7.0mm_Layout13x13_P0.5mm_Ball0.3mm_Pad0.25mm_NSMD.step": height 1.05, standoff -0.01, extent -3.5,-3.5 3.5,3.5

## BGA-144_13.0x13.0mm_Layout12x12_P1.0mm [mm] "BGA-144_13.0x13.0mm_Layout12x12_P1.0mm"
pads (144):
  round 0.5 smd: A1(-5.5,5.5) A2(-4.5,5.5) A3(-3.5,5.5) A4(-2.5,5.5) A5(-1.5,5.5) A6(-0.5,5.5) A7(0.5,5.5) A8(1.5,5.5) A9(2.5,5.5) A10(3.5,5.5) A11(4.5,5.5) A12(5.5,5.5) B1(-5.5,4.5) B2(-4.5,4.5) B3(-3.5,4.5) B4(-2.5,4.5) B5(-1.5,4.5) B6(-0.5,4.5) B7(0.5,4.5) B8(1.5,4.5) B9(2.5,4.5) B10(3.5,4.5) B11(4.5,4.5) B12(5.5,4.5) C1(-5.5,3.5) C2(-4.5,3.5) C3(-3.5,3.5) C4(-2.5,3.5) C5(-1.5,3.5) C6(-0.5,3.5) C7(0.5,3.5) C8(1.5,3.5) C9(2.5,3.5) C10(3.5,3.5) C11(4.5,3.5) C12(5.5,3.5) D1(-5.5,2.5) D2(-4.5,2.5) D3(-3.5,2.5) D4(-2.5,2.5) D5(-1.5,2.5) D6(-0.5,2.5) D7(0.5,2.5) D8(1.5,2.5) D9(2.5,2.5) D10(3.5,2.5) D11(4.5,2.5) D12(5.5,2.5) E1(-5.5,1.5) E2(-4.5,1.5) E3(-3.5,1.5) E4(-2.5,1.5) E5(-1.5,1.5) E6(-0.5,1.5) E7(0.5,1.5) E8(1.5,1.5) E9(2.5,1.5) E10(3.5,1.5) E11(4.5,1.5) E12(5.5,1.5) F1(-5.5,0.5) F2(-4.5,0.5) F3(-3.5,0.5) F4(-2.5,0.5) F5(-1.5,0.5) F6(-0.5,0.5) F7(0.5,0.5) F8(1.5,0.5) F9(2.5,0.5) F10(3.5,0.5) F11(4.5,0.5) F12(5.5,0.5) G1(-5.5,-0.5) G2(-4.5,-0.5) G3(-3.5,-0.5) G4(-2.5,-0.5) G5(-1.5,-0.5) G6(-0.5,-0.5) G7(0.5,-0.5) G8(1.5,-0.5) G9(2.5,-0.5) G10(3.5,-0.5) G11(4.5,-0.5) G12(5.5,-0.5) H1(-5.5,-1.5) H2(-4.5,-1.5) H3(-3.5,-1.5) H4(-2.5,-1.5) H5(-1.5,-1.5) H6(-0.5,-1.5) H7(0.5,-1.5) H8(1.5,-1.5) H9(2.5,-1.5) H10(3.5,-1.5) H11(4.5,-1.5) H12(5.5,-1.5) J1(-5.5,-2.5) J2(-4.5,-2.5) J3(-3.5,-2.5) J4(-2.5,-2.5) J5(-1.5,-2.5) J6(-0.5,-2.5) J7(0.5,-2.5) J8(1.5,-2.5) J9(2.5,-2.5) J10(3.5,-2.5) J11(4.5,-2.5) J12(5.5,-2.5) K1(-5.5,-3.5) K2(-4.5,-3.5) K3(-3.5,-3.5) K4(-2.5,-3.5) K5(-1.5,-3.5) K6(-0.5,-3.5) K7(0.5,-3.5) K8(1.5,-3.5) K9(2.5,-3.5) K10(3.5,-3.5) K11(4.5,-3.5) K12(5.5,-3.5) L1(-5.5,-4.5) L2(-4.5,-4.5) L3(-3.5,-4.5) L4(-2.5,-4.5) L5(-1.5,-4.5) L6(-0.5,-4.5) L7(0.5,-4.5) L8(1.5,-4.5) L9(2.5,-4.5) L10(3.5,-4.5) L11(4.5,-4.5) L12(5.5,-4.5) M1(-5.5,-5.5) M2(-4.5,-5.5) M3(-3.5,-5.5) M4(-2.5,-5.5) M5(-1.5,-5.5) M6(-0.5,-5.5) M7(0.5,-5.5) M8(1.5,-5.5) M9(2.5,-5.5) M10(3.5,-5.5) M11(4.5,-5.5) M12(5.5,-5.5)
F.SilkS:
  region: -6.6,6.6 -7.1,6.6 -6.6,7.1
  lines w0.254: -6.6,6.28 -6.6,-6.6 6.6,-6.6 6.6,6.6 -6.28,6.6
Top Component Center:
  lines w0.127: -0.127,0 0.127,0 -0.127,0 ; 0,-0.127 0,0.127 0,-0.127
Top Assembly:
  lines w0.254: -6.5,-6.5 6.5,-6.5 6.5,6.5 -6,6.5 -6.5,6 -6.5,-6.5
Top Courtyard:
  lines w0.254: -7.5,-7.5 7.5,-7.5 7.5,7.5 -7.5,7.5 -7.5,-7.5
Top Designator:
  text ".Designator" at -3.432,-0.345 h1.52
3D body "BGA-144_13.0x13.0mm_Layout12x12_P1.0mm.step": height 1.6, standoff -0.02, extent -6.5,-6.5 6.5,6.5

## BGA-152_14x18mm_Layout13x17_P0.5mm [mm] "BGA-152_14x18mm_Layout13x17_P0.5mm"
pads (152):
  round 0.5 smd: A1(-6,8) A2(-5,8) A3(-4,8) A4(-3,8) A10(3,8) A11(4,8) A12(5,8) A13(6,8) B1(-6,7) B2(-5,7) B3(-4,7) B4(-3,7) B10(3,7) B11(4,7) B12(5,7) B13(6,7) C1(-6,6) C2(-5,6) C3(-4,6) C4(-3,6) C10(3,6) C11(4,6) C12(5,6) C13(6,6) D1(-6,5) D2(-5,5) D3(-4,5) D4(-3,5) D5(-2,5) D6(-1,5) D8(1,5) D9(2,5) D10(3,5) D11(4,5) D12(5,5) D13(6,5) E1(-6,4) E2(-5,4) E3(-4,4) E4(-3,4) E5(-2,4) E6(-1,4) E8(1,4) E9(2,4) E10(3,4) E11(4,4) E12(5,4) E13(6,4) F3(-4,3) F4(-3,3) F5(-2,3) F6(-1,3) F8(1,3) F9(2,3) F10(3,3) F11(4,3) G3(-4,2) G4(-3,2) G5(-2,2) G6(-1,2) G8(1,2) G9(2,2) G10(3,2) G11(4,2) H3(-4,1) H4(-3,1) H5(-2,1) H6(-1,1) H8(1,1) H9(2,1) H10(3,1) H11(4,1) J3(-4,0) J4(-3,0) J5(-2,0) J6(-1,0) J8(1,0) J9(2,0) J10(3,0) J11(4,0) K3(-4,-1) K4(-3,-1) K5(-2,-1) K6(-1,-1) K8(1,-1) K9(2,-1) K10(3,-1) K11(4,-1) L3(-4,-2) L4(-3,-2) L5(-2,-2) L6(-1,-2) L8(1,-2) L9(2,-2) L10(3,-2) L11(4,-2) M3(-4,-3) M4(-3,-3) M5(-2,-3) M6(-1,-3) M8(1,-3) M9(2,-3) M10(3,-3) M11(4,-3) N1(-6,-4) N2(-5,-4) N3(-4,-4) N4(-3,-4) N5(-2,-4) N6(-1,-4) N8(1,-4) N9(2,-4) N10(3,-4) N11(4,-4) N12(5,-4) N13(6,-4) P1(-6,-5) P2(-5,-5) P3(-4,-5) P4(-3,-5) P5(-2,-5) P6(-1,-5) P8(1,-5) P9(2,-5) P10(3,-5) P11(4,-5) P12(5,-5) P13(6,-5) R1(-6,-6) R2(-5,-6) R3(-4,-6) R4(-3,-6) R10(3,-6) R11(4,-6) R12(5,-6) R13(6,-6) T1(-6,-7) T2(-5,-7) T3(-4,-7) T4(-3,-7) T10(3,-7) T11(4,-7) T12(5,-7) T13(6,-7) U1(-6,-8) U2(-5,-8) U3(-4,-8) U4(-3,-8) U10(3,-8) U11(4,-8) U12(5,-8) U13(6,-8)
F.SilkS:
  region: -7.15,9.15 -7.65,9.15 -7.15,9.65
  lines w0.254: -7.15,8.83 -7.15,-9.15 7.15,-9.15 7.15,9.15 -6.83,9.15
Top Component Center:
  lines w0.127: -0.127,0 0.127,0 -0.127,0 ; 0,-0.127 0,0.127 0,-0.127
Top Assembly:
  lines w0.254: -7,-9 -7,8 -6,9 7,9 7,-9 -7,-9
  text "'.Designator'" at -4.047,9.16 h1
Top Courtyard:
  lines w0.254: -8,-10 -8,10 8,10 8,-10 -8,-10
Top Designator:
  text ".Designator" at -3.305,-0.218 h1.52

## BGA-152_14x18mm_Layout13x17_P1mm [mm] "BGA-152_14x18mm_Layout13x17_P1mm"
pads (152):
  round 0.36 smd: A1(-6,8) A2(-5,8) A3(-4,8) A4(-3,8) A10(3,8) A11(4,8) A12(5,8) A13(6,8) B1(-6,7) B2(-5,7) B3(-4,7) B4(-3,7) B10(3,7) B11(4,7) B12(5,7) B13(6,7) C1(-6,6) C2(-5,6) C3(-4,6) C4(-3,6) C10(3,6) C11(4,6) C12(5,6) C13(6,6) D1(-6,5) D2(-5,5) D3(-4,5) D4(-3,5) D5(-2,5) D6(-1,5) D8(1,5) D9(2,5) D10(3,5) D11(4,5) D12(5,5) D13(6,5) E1(-6,4) E2(-5,4) E3(-4,4) E4(-3,4) E5(-2,4) E6(-1,4) E8(1,4) E9(2,4) E10(3,4) E11(4,4) E12(5,4) E13(6,4) F3(-4,3) F4(-3,3) F5(-2,3) F6(-1,3) F8(1,3) F9(2,3) F10(3,3) F11(4,3) G3(-4,2) G4(-3,2) G5(-2,2) G6(-1,2) G8(1,2) G9(2,2) G10(3,2) G11(4,2) H3(-4,1) H4(-3,1) H5(-2,1) H6(-1,1) H8(1,1) H9(2,1) H10(3,1) H11(4,1) J3(-4,0) J4(-3,0) J5(-2,0) J6(-1,0) J8(1,0) J9(2,0) J10(3,0) J11(4,0) K3(-4,-1) K4(-3,-1) K5(-2,-1) K6(-1,-1) K8(1,-1) K9(2,-1) K10(3,-1) K11(4,-1) L3(-4,-2) L4(-3,-2) L5(-2,-2) L6(-1,-2) L8(1,-2) L9(2,-2) L10(3,-2) L11(4,-2) M3(-4,-3) M4(-3,-3) M5(-2,-3) M6(-1,-3) M8(1,-3) M9(2,-3) M10(3,-3) M11(4,-3) N1(-6,-4) N2(-5,-4) N3(-4,-4) N4(-3,-4) N5(-2,-4) N6(-1,-4) N8(1,-4) N9(2,-4) N10(3,-4) N11(4,-4) N12(5,-4) N13(6,-4) P1(-6,-5) P2(-5,-5) P3(-4,-5) P4(-3,-5) P5(-2,-5) P6(-1,-5) P8(1,-5) P9(2,-5) P10(3,-5) P11(4,-5) P12(5,-5) P13(6,-5) R1(-6,-6) R2(-5,-6) R3(-4,-6) R4(-3,-6) R10(3,-6) R11(4,-6) R12(5,-6) R13(6,-6) T1(-6,-7) T2(-5,-7) T3(-4,-7) T4(-3,-7) T10(3,-7) T11(4,-7) T12(5,-7) T13(6,-7) U1(-6,-8) U2(-5,-8) U3(-4,-8) U4(-3,-8) U10(3,-8) U11(4,-8) U12(5,-8) U13(6,-8)
F.SilkS:
  region: -7.11,9.11 -7.61,9.11 -7.11,9.61
  lines w0.254: -7.11,8.11 -7.11,-9.11 7.11,-9.11 7.11,9.11 -6.11,9.11
Top Component Center:
  lines w0.127: -0.127,0 0.127,0 -0.127,0 ; 0,-0.127 0,0.127 0,-0.127
Top Assembly:
  lines w0.254: -7,-9 7,-9 7,9 -6,9 -7,8 -7,-9
Top Courtyard:
  lines w0.254: -8,-10 8,-10 8,10 -8,10 -8,-10
Top Designator:
  text ".Designator" at -3.432,-0.345 h1.52

## BGA-153_8.0x8.0mm_Layout15x15_P0.5mm_Ball0.3mm_Pad0.25mm_NSMD [mm] "BGA-153_8.0x8.0mm_Layout15x15_P0.5mm_Ball0.3mm_Pad0.25mm_NSMD"
pads (153):
  round 0.25 smd: A1(-3.5,3.5) A2(-3,3.5) A3(-2.5,3.5) A5(-1.5,3.5) A7(-0.5,3.5) A9(0.5,3.5) A11(1.5,3.5) A13(2.5,3.5) A14(3,3.5) A15(3.5,3.5) B1(-3.5,3) B2(-3,3) B3(-2.5,3) B4(-2,3) B5(-1.5,3) B6(-1,3) B7(-0.5,3) B8(0,3) B9(0.5,3) B10(1,3) B11(1.5,3) B12(2,3) B13(2.5,3) B14(3,3) B15(3.5,3) C1(-3.5,2.5) C2(-3,2.5) C8(0,2.5) C14(3,2.5) C15(3.5,2.5) D2(-3,2) D4(-2,2) D5(-1.5,2) D6(-1,2) D7(-0.5,2) D8(0,2) D9(0.5,2) D10(1,2) D11(1.5,2) D12(2,2) D14(3,2) E1(-3.5,1.5) E2(-3,1.5) E4(-2,1.5) E5(-1.5,1.5) E6(-1,1.5) E7(-0.5,1.5) E8(0,1.5) E9(0.5,1.5) E10(1,1.5) E11(1.5,1.5) E12(2,1.5) E14(3,1.5) E15(3.5,1.5) F2(-3,1) F4(-2,1) F5(-1.5,1) F11(1.5,1) F12(2,1) F14(3,1) G1(-3.5,0.5) G2(-3,0.5) G4(-2,0.5) G5(-1.5,0.5) G7(-0.5,0.5) G8(0,0.5) G9(0.5,0.5) G11(1.5,0.5) G12(2,0.5) G14(3,0.5) G15(3.5,0.5) H2(-3,0) H3(-2.5,0) H4(-2,0) H5(-1.5,0) H7(-0.5,0) H8(0,0) H9(0.5,0) H11(1.5,0) H12(2,0) H13(2.5,0) H14(3,0) J1(-3.5,-0.5) J2(-3,-0.5) J4(-2,-0.5) J5(-1.5,-0.5) J7(-0.5,-0.5) J8(0,-0.5) J9(0.5,-0.5) J11(1.5,-0.5) J12(2,-0.5) J14(3,-0.5) J15(3.5,-0.5) K2(-3,-1) K4(-2,-1) K5(-1.5,-1) K11(1.5,-1) K12(2,-1) K14(3,-1) L1(-3.5,-1.5) L2(-3,-1.5) L4(-2,-1.5) L5(-1.5,-1.5) L6(-1,-1.5) L7(-0.5,-1.5) L8(0,-1.5) L9(0.5,-1.5) L10(1,-1.5) L11(1.5,-1.5) L12(2,-1.5) L14(3,-1.5) L15(3.5,-1.5) M2(-3,-2) M4(-2,-2) M5(-1.5,-2) M6(-1,-2) M7(-0.5,-2) M8(0,-2) M9(0.5,-2) M10(1,-2) M11(1.5,-2) M12(2,-2) M14(3,-2) N1(-3.5,-2.5) N2(-3,-2.5) N8(0,-2.5) N14(3,-2.5) N15(3.5,-2.5) P1(-3.5,-3) P2(-3,-3) P3(-2.5,-3) P4(-2,-3) P5(-1.5,-3) P6(-1,-3) P7(-0.5,-3) P8(0,-3) P9(0.5,-3) P10(1,-3) P11(1.5,-3) P12(2,-3) P13(2.5,-3) P14(3,-3) P15(3.5,-3) R1(-3.5,-3.5) R2(-3,-3.5) R3(-2.5,-3.5) R5(-1.5,-3.5) R7(-0.5,-3.5) R9(0.5,-3.5) R11(1.5,-3.5) R13(2.5,-3.5) R14(3,-3.5) R15(3.5,-3.5)
F.SilkS:
  region: -4.15,4.15 -4.65,4.15 -4.15,4.65
  lines w0.254: -4.15,-2.15 -4.15,-4.15 -2.15,-4.15 ; -4.15,2.14 -4.15,3.83 ; -3.83,4.15 -2.15,4.15 ; 2.15,-4.15 4.15,-4.15 4.15,-2.15 ; 2.15,4.15 4.15,4.15 4.15,2.15
Top Component Center:
  lines w0.127: -0.127,0 0.127,0 -0.127,0 ; 0,-0.127 0,0.127 0,-0.127
Top Assembly:
  lines w0.254: -4,-4 -4,3.5 -3.5,4 4,4 4,-4 -4,-4
Top Courtyard:
  lines w0.254: -5,-5 -5,5 5,5 5,-5 -5,-5
Top Designator:
  text ".Designator" at -3.432,-0.345 h1.52

## BGA-169_11.0x11.0mm_Layout13x13_P0.8mm_Ball0.5mm_Pad0.4mm_NSMD [mm] "BGA-169_11.0x11.0mm_Layout13x13_P0.8mm_Ball0.5mm_Pad0.4mm_NSMD"
pads (169):
  round 0.4 smd: A1(-4.8,4.8) A2(-4,4.8) A3(-3.2,4.8) A4(-2.4,4.8) A5(-1.6,4.8) A6(-0.8,4.8) A7(0,4.8) A8(0.8,4.8) A9(1.6,4.8) A10(2.4,4.8) A11(3.2,4.8) A12(4,4.8) A13(4.8,4.8) B1(-4.8,4) B2(-4,4) B3(-3.2,4) B4(-2.4,4) B5(-1.6,4) B6(-0.8,4) B7(0,4) B8(0.8,4) B9(1.6,4) B10(2.4,4) B11(3.2,4) B12(4,4) B13(4.8,4) C1(-4.8,3.2) C2(-4,3.2) C3(-3.2,3.2) C4(-2.4,3.2) C5(-1.6,3.2) C6(-0.8,3.2) C7(0,3.2) C8(0.8,3.2) C9(1.6,3.2) C10(2.4,3.2) C11(3.2,3.2) C12(4,3.2) C13(4.8,3.2) D1(-4.8,2.4) D2(-4,2.4) D3(-3.2,2.4) D4(-2.4,2.4) D5(-1.6,2.4) D6(-0.8,2.4) D7(0,2.4) D8(0.8,2.4) D9(1.6,2.4) D10(2.4,2.4) D11(3.2,2.4) D12(4,2.4) D13(4.8,2.4) E1(-4.8,1.6) E2(-4,1.6) E3(-3.2,1.6) E4(-2.4,1.6) E5(-1.6,1.6) E6(-0.8,1.6) E7(0,1.6) E8(0.8,1.6) E9(1.6,1.6) E10(2.4,1.6) E11(3.2,1.6) E12(4,1.6) E13(4.8,1.6) F1(-4.8,0.8) F2(-4,0.8) F3(-3.2,0.8) F4(-2.4,0.8) F5(-1.6,0.8) F6(-0.8,0.8) F7(0,0.8) F8(0.8,0.8) F9(1.6,0.8) F10(2.4,0.8) F11(3.2,0.8) F12(4,0.8) F13(4.8,0.8) G1(-4.8,0) G2(-4,0) G3(-3.2,0) G4(-2.4,0) G5(-1.6,0) G6(-0.8,0) G7(0,0) G8(0.8,0) G9(1.6,0) G10(2.4,0) G11(3.2,0) G12(4,0) G13(4.8,0) H1(-4.8,-0.8) H2(-4,-0.8) H3(-3.2,-0.8) H4(-2.4,-0.8) H5(-1.6,-0.8) H6(-0.8,-0.8) H7(0,-0.8) H8(0.8,-0.8) H9(1.6,-0.8) H10(2.4,-0.8) H11(3.2,-0.8) H12(4,-0.8) H13(4.8,-0.8) J1(-4.8,-1.6) J2(-4,-1.6) J3(-3.2,-1.6) J4(-2.4,-1.6) J5(-1.6,-1.6) J6(-0.8,-1.6) J7(0,-1.6) J8(0.8,-1.6) J9(1.6,-1.6) J10(2.4,-1.6) J11(3.2,-1.6) J12(4,-1.6) J13(4.8,-1.6) K1(-4.8,-2.4) K2(-4,-2.4) K3(-3.2,-2.4) K4(-2.4,-2.4) K5(-1.6,-2.4) K6(-0.8,-2.4) K7(0,-2.4) K8(0.8,-2.4) K9(1.6,-2.4) K10(2.4,-2.4) K11(3.2,-2.4) K12(4,-2.4) K13(4.8,-2.4) L1(-4.8,-3.2) L2(-4,-3.2) L3(-3.2,-3.2) L4(-2.4,-3.2) L5(-1.6,-3.2) L6(-0.8,-3.2) L7(0,-3.2) L8(0.8,-3.2) L9(1.6,-3.2) L10(2.4,-3.2) L11(3.2,-3.2) L12(4,-3.2) L13(4.8,-3.2) M1(-4.8,-4) M2(-4,-4) M3(-3.2,-4) M4(-2.4,-4) M5(-1.6,-4) M6(-0.8,-4) M7(0,-4) M8(0.8,-4) M9(1.6,-4) M10(2.4,-4) M11(3.2,-4) M12(4,-4) M13(4.8,-4) N1(-4.8,-4.8) N2(-4,-4.8) N3(-3.2,-4.8) N4(-2.4,-4.8) N5(-1.6,-4.8) N6(-0.8,-4.8) N7(0,-4.8) N8(0.8,-4.8) N9(1.6,-4.8) N10(2.4,-4.8) N11(3.2,-4.8) N12(4,-4.8) N13(4.8,-4.8)
F.SilkS:
  region: -5.65,5.65 -6.15,5.65 -5.65,6.15
  lines w0.254: -5.65,-2.9 -5.65,-5.65 -2.9,-5.65 ; -5.65,2.9 -5.65,5.33 ; -5.33,5.65 -2.9,5.65 ; 2.9,-5.65 5.65,-5.65 5.65,-2.9 ; 2.9,5.65 5.65,5.65 5.65,2.9
Top Component Center:
  lines w0.127: -0.127,0 0.127,0 -0.127,0 ; 0,-0.127 0,0.127 0,-0.127
Top Assembly:
  lines w0.254: -5.5,-5.5 5.5,-5.5 5.5,5.5 -4.7,5.5 -5.5,4.7 -5.5,-5.5
Top Courtyard:
  lines w0.254: -6.5,-6.5 6.5,-6.5 6.5,6.5 -6.5,6.5 -6.5,-6.5
Top Designator:
  text ".Designator" at -3.432,-0.345 h1.52
3D body "BGA-169_11.0x11.0mm_Layout13x13_P0.8mm_Ball0.5mm_Pad0.4mm_NSMD.step": height 1.4, standoff -0.01, extent -5.5,-5.5 5.5,5.5